# Altium integrated library 0452003PMRL.IntLib: 1 symbol
Pins are listed as number, name and electrical type; pins without a type are passive.

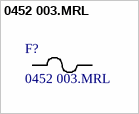
[diagram p0: symbol 0452 003.MRL]

## 0452 003.MRL
designator F?
Description; Manufacturer_Name: Littelfuse Inc; Copyright: Copyright (C) 2025 Ultra Librarian. All rights reserved.; Manufacturer_Part_Number: 0452 003.MRL
footprint FUS_LITTELFUSE_0452_LTF
pins: 1, 2